# EAGLE library part CON_MOLEX_MALE_SMT_RIGHT_ANGLE_1.25 (library dp_devices.v6)
Molex 1.25mm PicoBlade Header right angle SMT 10 circuits p/n: 532611071
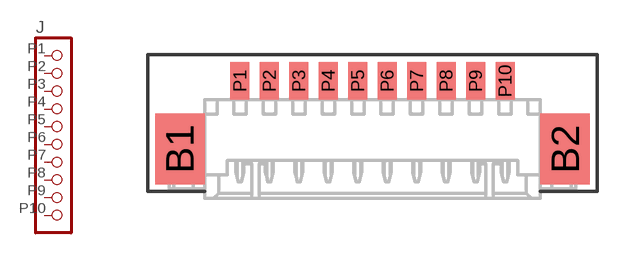
[diagram p211: symbol with the pads of MOLEX_532611071; footprint MOLEX_532611071]

Designator prefix J

## CON_MOLEX_MALE_SMT_RIGHT_ANGLE_1.25  [MOLEX_532611071]
P1  1  pas
P2  2  pas
P3  3  pas
P4  4  pas
P5  5  pas
P6  6  pas
P7  7  pas
P8  8  pas
P9  9  pas
P10  10  pas

## Footprint MOLEX_532611071 (pad centres in mm)
smd 2.1 x 3: B1 -8.175,0; B2 8.175,0
smd 0.8 x 1.6: P1 -5.625,2.9; P2 -4.375,2.9; P3 -3.125,2.9; P4 -1.875,2.9; P5 -0.625,2.9; P6 0.625,2.9; P7 1.875,2.9; P8 3.125,2.9; P9 4.375,2.9; P10 5.625,2.9